# EAGLE library part 6213XX284521_621314284521 (library WR-PHD)
WR-PHD 2.00 mm SMT Angled Dual Pin Header Article Properties Pins 4 unitless; 6 unitless; 8 unitless; 10 unitless; 12 unitless; 14 unitless; 16 unitless; 20 unitless General Information Operating Temperature -40 °C up to +105 °C Compliance Lead free / RoHS Pitch 2 mm Durability 50 Cycles Rows Dual Gender Pin Header Type Angled Material Properties Insulator Material PA9T Insulator Flammability Rating UL94 V-0 Contact Material Copper Alloy Contact Plating Gold Contact Type Stamped Certification UL Approval E323964 Packaging Properties Packaging Tape and Reel with Pad Electrical Properties IR 2 A Withstanding Voltage 500 V (AC) Contact Resistance 20 mΩ RISO 1000 MΩ <https://www.we-online.com/components/media/o106798v209%20Family_WR-PHD_6213xx284521.jpg> Details see: www.we-online.com/en/components/products/PHD_2_00_SMT_ANGLED_DUAL_PIN_HEADER_6213XX284521 <www.we-online.com/en/components/products/PHD_2_00_SMT_ANGLED_DUAL_PIN_HEADER_6213XX284521/?utm_source=eagle_model&utm_medium=description_link&utm_campaign=eisos_eagle> Updated by Ella 2024-02-05 2024 (C) Würth Elektronik
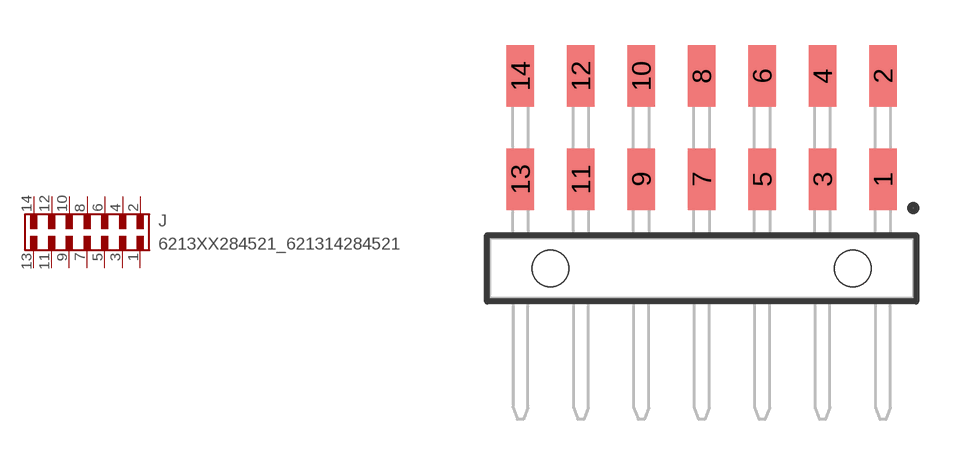
[diagram p358: symbol with the pads of 621314284521; footprint 621314284521]

Designator prefix J

## 6213XX284521_621314284521 (DATASHEET-URL: https://www.we-online.com/redexpert/spec/621314284521?ae; GENDER: Pin Header; IR: 2A; PACKAGING: Tape and Reel with Pad; PART-NUMBER: 621314284521; PINS: 14; PITCH: 2.00 mm; ROWS: Dual; TYPE: Angled; VALUE: 621314284521)  [621314284521]
1  1  pas
2  2  pas
3  3  pas
4  4  pas
5  5  pas
6  6  pas
7  7  pas
8  8  pas
9  9  pas
10  10  pas
11  11  pas
12  12  pas
13  13  pas
14  14  pas

## Footprint 621314284521 (pad centres in mm)
WR-PHD 2.00 mm SMT Angled Dual Pin Header,14Pins
smd 0.9 x 2.03: 1 6,2.95; 2 6,6.37; 3 4,2.95; 4 4,6.37; 5 2,2.95; 6 2,6.37; 7 0,2.95; 8 0,6.37; 9 -2,2.95; 10 -2,6.37; 11 -4,2.95; 12 -4,6.37; 13 -6,2.95; 14 -6,6.37
hole 1.2 at 5,0
hole 1.2 at -5,0